# Altium footprint library WR-MJ.PcbLib: 84 footprints (part 1 of 6)
Each footprint in its own frame and in the unit in brackets; x right, y up, seen from the top. Pads: shape width x height; smd on the part's side, far side on the other; paste and mask are expansions set on the pad; w line width, h text height; cw(c..) or ccw(c..) is an arc to the next point about the centre after c.
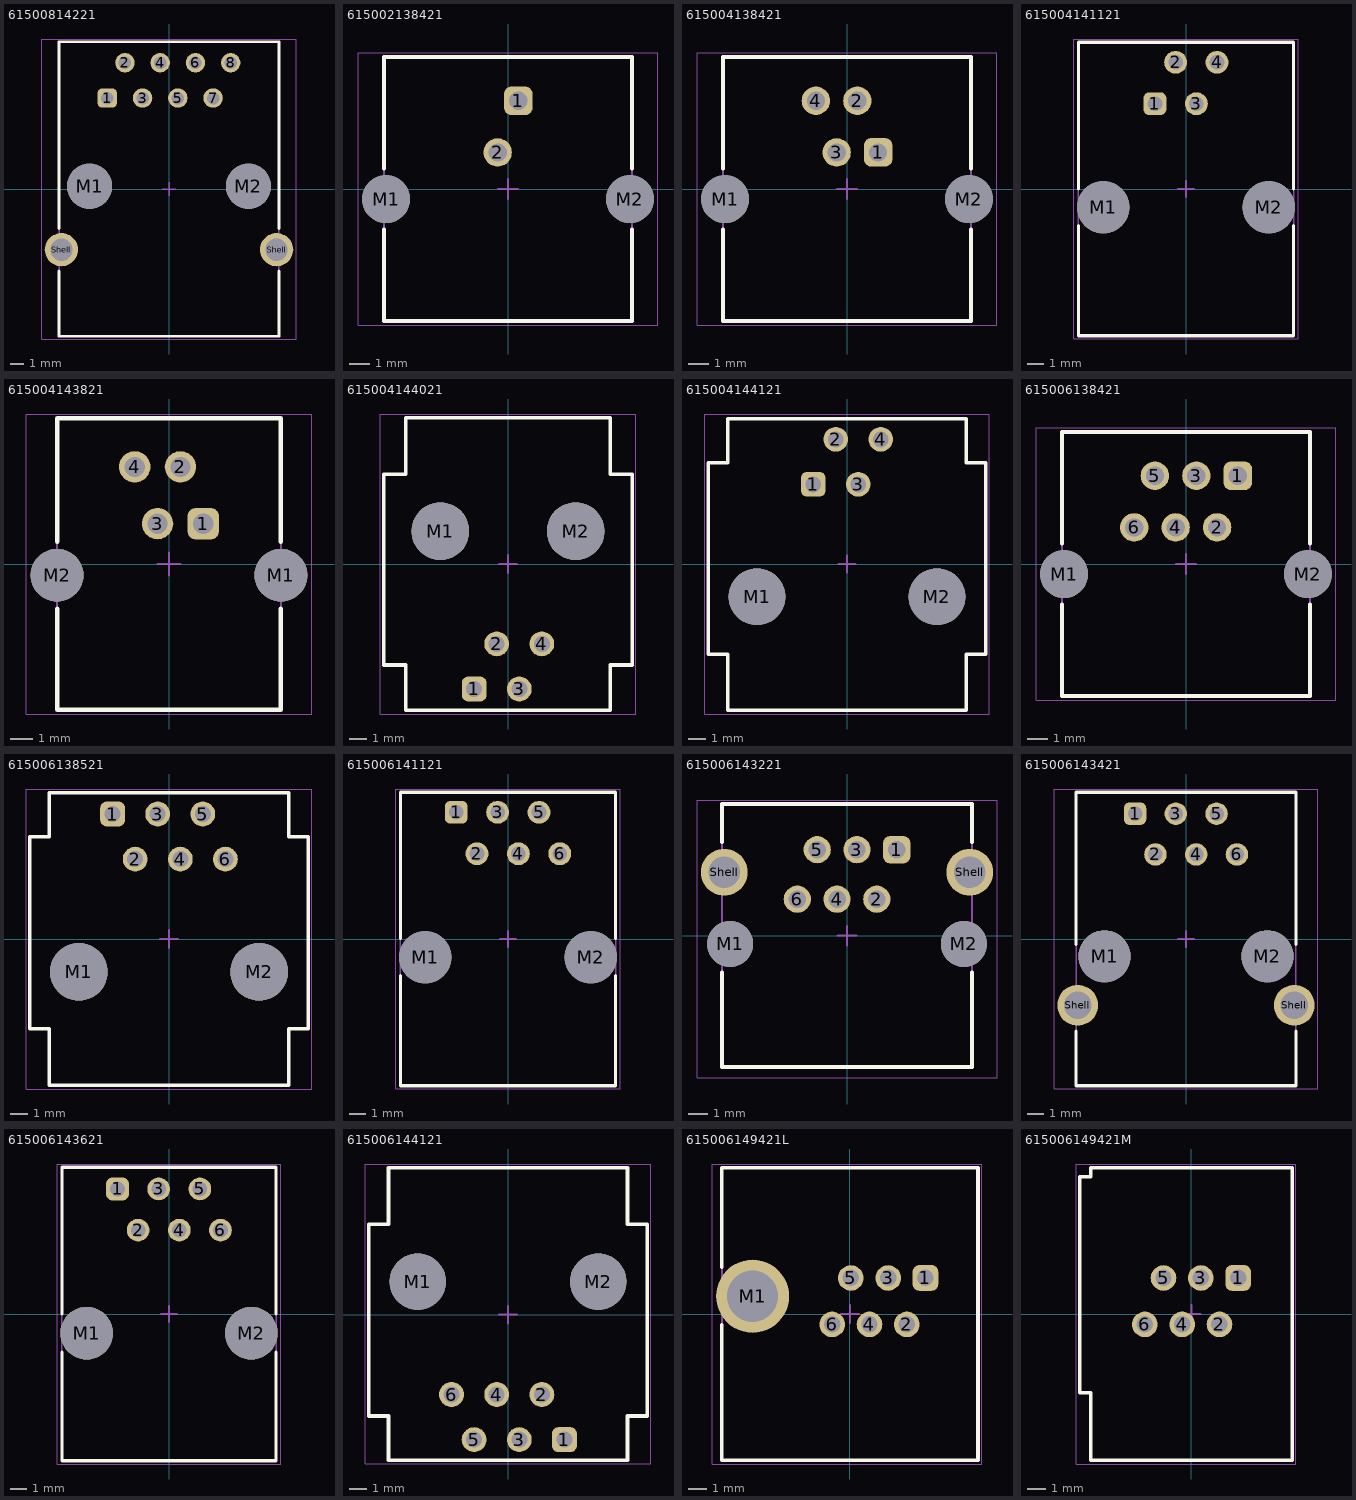
[diagram p0: the footprints below, top view; thin cyan lines are the x and y axes]

## 61500814221 [mm] "Modular Jack Horizontal Shielded 8P8C Tab Down"
height 13.65
pads (12):
  rrect50% 1.4x1.4 hole 0.9: 1(-4.445,6.55)
  round 1.4 hole 0.9: 2(-3.175,9.09) 3(-1.905,6.55) 4(-0.635,9.09) 5(0.635,6.55) 6(1.905,9.09) 7(3.175,6.55) 8(4.445,9.09)
  round 3.25 hole 3.25 unplated: M1(-5.715,0.2) M2(5.715,0.2)
  round 2.4 hole 1.6: Shell(-7.75,-4.37) Shell(7.75,-4.37)
Top Overlay:
  lines w0.2: -7.92,-5.9 -7.92,-10.6 7.92,-10.6 7.92,-5.9 ; -7.92,-2.85 -7.92,10.6 7.92,10.6 7.92,-2.85
Top Assembly:
  lines w0.1: -7.92,-10.6 7.92,-10.6 7.92,10.6 -7.92,10.6 -7.92,-10.6
Top Designator:
  text ".Designator" at -3.647,-0.357 h1
Top Courtyard:
  lines w0.05: -9.15,-10.8 -9.15,10.8 9.15,10.8 9.15,-10.8 -9.15,-10.8
Top Component Center:
  lines w0.1: -0.5,0 0.5,0 ; 0,-0.5 0,0.5
3D body "61500814221 (rev1).stp": height 13.7, standoff -3.9, extent -7.9,-10.6 7.9,10.6

## 615002138421 [mm] "Modular Jack Horizontal Plastic 6P2C Tab Up"
height 14.5
pads (4):
  rrect50% 1.4x1.4 hole 0.9: 1(0.51,4.34)
  round 1.4 hole 0.9: 2(-0.51,1.8)
  round 2.36 hole 2.36 unplated: M1(-6,-0.5) M2(6,-0.5)
Top Overlay:
  lines w0.2: -6.1,-2 -6.1,-6.5 6.1,-6.5 6.1,-2 ; -6.1,1 -6.1,6.5 6.1,6.5 6.1,1
Top Assembly:
  lines w0.1: -6.1,-6.5 -6.1,6.5 6.1,6.5 6.1,-6.5 -6.1,-6.5
Top Designator:
  text ".Designator" at -3.647,-0.357 h1
Top Courtyard:
  lines w0.05: -7.38,-6.7 7.38,-6.7 7.38,6.7 -7.38,6.7 -7.38,-6.7
Top Component Center:
  lines w0.1: -0.5,0 0.5,0 ; 0,-0.5 0,0.5
3D body "615002138421.stp": height 14.55, standoff -3.35, extent -7.2,-6.5 7.2,6.5

## 615004138421 [mm] "Modular Jack Horizontal Plastic 6P4C Tab Up"
height 14.5
pads (6):
  rrect50% 1.4x1.4 hole 0.9: 1(1.53,1.8)
  round 1.4 hole 0.9: 2(0.51,4.34) 3(-0.51,1.8) 4(-1.53,4.34)
  round 2.36 hole 2.36 unplated: M1(-6,-0.5) M2(6,-0.5)
Top Overlay:
  lines w0.2: -6.1,-2 -6.1,-6.5 6.1,-6.5 6.1,-2 ; -6.1,1 -6.1,6.5 6.1,6.5 6.1,1
Top Assembly:
  lines w0.1: -6.1,-6.5 6.1,-6.5 6.1,6.5 -6.1,6.5 -6.1,-6.5
Top Designator:
  text ".Designator" at -3.647,-0.357 h1
Top Courtyard:
  lines w0.05: -7.38,-6.7 7.38,-6.7 7.38,6.7 -7.38,6.7 -7.38,-6.7
Top Component Center:
  lines w0.1: -0.5,0 0.5,0 ; 0,-0.5 0,0.5
3D body "615004138421.stp": height 14.55, standoff -3.35, extent -7.2,-6.5 7.2,6.5

## 615004141121 [mm] "Modular Jack Horizontal Plastic 6P4C Tab Down"
height 11.65
pads (6):
  rrect50% 1.4x1.4 hole 0.9: 1(-1.905,5.23)
  round 1.4 hole 0.9: 2(-0.635,7.77) 3(0.635,5.23) 4(1.905,7.77)
  round 3.2 hole 3.2 unplated: M1(-5.08,-1.12) M2(5.08,-1.12)
Top Overlay:
  lines w0.2: -6.6,-2.239 -6.6,-9 6.6,-9 6.6,-2.239 ; -6.6,0 -6.6,9 6.6,9 6.6,0
Top Assembly:
  lines w0.1: -6.6,-9 -6.6,9 6.6,9 6.6,-9 -6.6,-9
Top Designator:
  text ".Designator" at -3.647,-0.357 h1
Top Courtyard:
  lines w0.05: -6.88,-9.2 -6.88,9.2 6.88,9.2 6.88,-9.2 -6.88,-9.2
Top Component Center:
  lines w0.1: -0.5,0 0.5,0 ; 0,-0.5 0,0.5
3D body "615004141121.stp": height 11.73, standoff -3.22, extent -6.6,-9 6.6,9

## 615004143821 [mm] "Modular Jack Horizontal Plastic 4P4C Tab Up"
height 14.5
pads (6):
  rrect50% 1.4x1.4 hole 0.9: 1(1.53,1.8)
  round 1.4 hole 0.9: 2(0.51,4.34) 3(-0.51,1.8) 4(-1.53,4.34)
  round 2.36 hole 2.36 unplated: M1(5,-0.5) M2(-5,-0.5)
Top Overlay:
  lines w0.2: -5,-2 -5,-6.5 5,-6.5 5,-2 ; -5,1 -5,6.5 5,6.5 5,1
Top Assembly:
  lines w0.1: -5,-6.5 -5,6.5 5,6.5 5,-6.5 -5,-6.5
Top Designator:
  text ".Designator" at -3.647,-0.357 h1
Top Courtyard:
  lines w0.05: -6.38,-6.7 -6.38,6.7 6.38,6.7 6.38,-6.7 -6.38,-6.7
Top Component Center:
  lines w0.1: -0.5,0 0.5,0 ; 0,-0.5 0,0.5
3D body "615004143821.stp": height 14.55, standoff -3.4, extent -6.275,-6.5 6.275,6.5

## 615004144021 [mm] "Modular Jack Vertical Plastic 4P4C with Ears"
height 16.38
pads (6):
  rrect50% 1.4x1.4 hole 0.9: 1(-1.905,-7.04)
  round 1.4 hole 0.9: 2(-0.635,-4.5) 3(0.635,-7.04) 4(1.905,-4.5)
  round 3.25 hole 3.25 unplated: M1(-3.81,1.85) M2(3.81,1.85)
Top Overlay:
  lines w0.2: -6.99,-5.69 -6.99,5.06 -5.75,5.06 -5.75,8.25 5.75,8.25 5.75,5.06 6.99,5.06 6.99,-5.69 5.75,-5.69 5.75,-8.25 -5.75,-8.25 -5.75,-5.69 -6.99,-5.69
Top Assembly:
  lines w0.1: -6.99,-5.69 -5.75,-5.69 -5.75,-8.25 5.75,-8.25 5.75,-5.69 6.99,-5.69 6.99,5.06 5.75,5.06 5.75,8.25 -5.75,8.25 -5.75,5.06 -6.99,5.06 -6.99,-5.69
Top Designator:
  text ".Designator" at -3.647,-0.357 h1
Top Courtyard:
  lines w0.05: -7.19,-8.45 7.19,-8.45 7.19,8.45 -7.19,8.45 -7.19,-8.45
Top Component Center:
  lines w0.1: -0.5,0 0.5,0 ; 0,-0.5 0,0.5
3D body "615004144021 (rev1).stp": height 16.44, standoff -3.24, extent -6.985,-8.25 6.985,8.25

## 615004144121 [mm] "Modular Jack Vertical Plastic 6P4C with Ears"
height 16.38
pads (6):
  rrect50% 1.4x1.4 hole 0.9: 1(-1.905,4.5)
  round 1.4 hole 0.9: 2(-0.635,7.04) 3(0.635,4.5) 4(1.905,7.04)
  round 3.2 hole 3.2 unplated: M1(-5.08,-1.85) M2(5.08,-1.85)
Top Overlay:
  lines w0.2: -7.845,-5.09 -6.725,-5.09 -6.725,-8.27 6.725,-8.27 6.725,-5.09 7.845,-5.09 7.845,5.71 6.725,5.71 6.725,8.21 -6.725,8.21 -6.725,5.71 -7.845,5.71 -7.845,-5.09
Top Assembly:
  lines w0.1: -7.845,-5.09 -7.845,5.71 -6.725,5.71 -6.725,8.21 6.725,8.21 6.725,5.71 7.845,5.71 7.845,-5.09 6.725,-5.09 6.725,-8.27 -6.725,-8.27 -6.725,-5.09 -7.845,-5.09
Top Designator:
  text ".Designator" at -3.647,-0.357 h1
Top Courtyard:
  lines w0.05: -8.045,-8.47 8.045,-8.47 8.045,8.47 -8.045,8.47 -8.045,-8.47
Top Component Center:
  lines w0.1: -0.5,0 0.5,0 ; 0,-0.5 0,0.5
3D body "615004144121 (rev1).stp": height 16.41, standoff -3.27, extent -7.83,-8.27 7.83,8.21

## 615006138421 [mm] "Modular Jack Horizontal Plastic 6P6C Tab Up"
height 14.5
pads (9):
  rrect50% 1.4x1.4 hole 0.9: 1(2.55,4.34)
  round 1.4 hole 0.9: 2(1.53,1.8) 3(0.51,4.34) 4(-0.51,1.8) 4(-0.51,1.8) 5(-1.53,4.34) 6(-2.55,1.8)
  round 2.36 hole 2.36 unplated: M1(-6,-0.5) M2(6,-0.5)
Top Overlay:
  lines w0.2: -6.1,-2 -6.1,-6.5 6.1,-6.5 6.1,-2 ; -6.1,1 -6.1,6.5 6.1,6.5 6.1,1
Top Assembly:
  lines w0.1: -6.1,-6.5 -6.1,6.5 6.1,6.5 6.1,-6.5 -6.1,-6.5
Top Designator:
  text ".Designator" at -3.647,-0.357 h1
Top Courtyard:
  lines w0.05: -7.38,-6.7 7.38,-6.7 7.38,6.7 -7.38,6.7 -7.38,-6.7
Top Component Center:
  lines w0.1: -0.5,0 0.5,0 ; 0,-0.5 0,0.5
3D body "615006138421.stp": height 14.55, standoff -3.35, extent -7.2,-6.5 7.2,6.5

## 615006138521 [mm] "Modular Jack Vertical Plastic 6P6C with Ears"
height 15.8
pads (8):
  rrect50% 1.4x1.4 hole 0.9: 1(-3.175,7.04)
  round 1.4 hole 0.9: 2(-1.905,4.5) 3(-0.635,7.04) 4(0.635,4.5) 5(1.905,7.04) 6(3.175,4.5)
  round 3.25 hole 3.25 unplated: M1(-5.08,-1.85) M2(5.08,-1.85)
Top Overlay:
  lines w0.2: -7.85,-5.05 -6.75,-5.05 -6.75,-8.25 6.75,-8.25 6.75,-5.05 7.85,-5.05 7.85,5.75 6.75,5.75 6.75,8.25 -6.75,8.25 -6.75,5.75 -7.85,5.75 -7.85,-5.05
Top Assembly:
  lines w0.1: -7.85,-5.05 -7.85,5.75 -6.75,5.75 -6.75,8.25 6.75,8.25 6.75,5.75 7.85,5.75 7.85,-5.05 6.75,-5.05 6.75,-8.25 -6.75,-8.25 -6.75,-5.05 -7.85,-5.05
Top Designator:
  text ".Designator" at -3.647,-0.357 h1
Top Courtyard:
  lines w0.05: -8.05,-8.45 -8.05,8.45 8.05,8.45 8.05,-8.45 -8.05,-8.45
Top Component Center:
  lines w0.1: -0.5,0 0.5,0 ; 0,-0.5 0,0.5
3D body "615006138521 (rev1).stp": height 16.2, standoff -3.4, extent -7.85,-8.25 7.85,8.25

## 615006141121 [mm] "Modular Jack Horizontal Plastic 6P6C Tab Down"
height 11.65
pads (8):
  rrect50% 1.4x1.4 hole 0.9: 1(-3.175,7.77)
  round 1.4 hole 0.9: 2(-1.905,5.23) 3(-0.635,7.77) 4(0.635,5.23) 5(1.905,7.77) 6(3.175,5.23)
  round 3.2 hole 3.2 unplated: M1(-5.08,-1.12) M2(5.08,-1.12)
Top Overlay:
  lines w0.2: -6.6,-2.25 -6.6,-9 6.6,-9 6.6,-2.25 ; -6.6,0.05 -6.6,9 6.6,9 6.6,0.05
Top Assembly:
  lines w0.1: -6.6,-9 6.6,-9 6.6,9 -6.6,9 -6.6,-9
Top Designator:
  text ".Designator" at -3.647,-0.357 h1
Top Courtyard:
  lines w0.05: -6.88,-9.2 6.88,-9.2 6.88,9.2 -6.88,9.2 -6.88,-9.2
Top Component Center:
  lines w0.1: -0.5,0 0.5,0 ; 0,-0.5 0,0.5
3D body "615006141121.stp": height 11.73, standoff -3.22, extent -6.6,-9 6.6,9

## 615006143221 [mm] "Modular Jack Horizontal Shielded 6P6C Tab Up"
height 14.75
pads (10):
  rrect50% 1.4x1.4 hole 0.9: 1(2.55,4.41)
  round 1.4 hole 0.9: 2(1.53,1.87) 3(0.51,4.41) 4(-0.51,1.87) 5(-1.53,4.41) 6(-2.55,1.87)
  round 2.36 hole 2.36 unplated: M1(-6,-0.43) M2(6,-0.43)
  round 2.4 hole 1.6: Shell(-6.3,3.25) Shell(6.3,3.25)
Top Overlay:
  lines w0.2: -6.425,-1.9 -6.425,-6.75 6.425,-6.75 6.425,-1.9 ; -6.425,4.8 -6.425,6.75 6.425,6.75 6.425,4.8
Top Assembly:
  lines w0.1: -6.425,-6.75 -6.425,6.75 6.425,6.75 6.425,-6.75 -6.425,-6.75
Top Designator:
  text ".Designator" at -3.647,-0.357 h1
Top Courtyard:
  lines w0.05: -7.7,-7.3 -7.7,6.95 7.7,6.95 7.7,-7.3 -7.7,-7.3
Top Component Center:
  lines w0.1: -0.5,0 0.5,0 ; 0,-0.5 0,0.5
3D body "615006143221 (rev1).stp": height 14.87, standoff -3.27, extent -7.179,-7.1 7.179,6.75

## 615006143421 [mm] "Modular Jack Horizontal Half Shielded 6P6C Tab Down"
height 13.07
pads (10):
  rrect50% 1.4x1.4 hole 0.9: 1(-3.175,7.81)
  round 1.4 hole 0.9: 2(-1.905,5.27) 3(-0.635,7.81) 4(0.635,5.27) 5(1.905,7.81) 6(3.175,5.27)
  round 3.25 hole 3.25 unplated: M1(-5.08,-1.08) M2(5.08,-1.08)
  round 2.55 hole 1.7: Shell(-6.75,-4.13) Shell(6.75,-4.13)
Top Overlay:
  lines w0.2: -6.85,-5.75 -6.85,-9.15 6.85,-9.15 6.85,-5.75 ; -6.85,-0.35 -6.85,9.15 6.85,9.15 6.85,-0.35
Top Assembly:
  lines w0.1: -6.85,-9.15 -6.85,9.15 6.85,9.15 6.85,-9.15 -6.85,-9.15
Top Designator:
  text ".Designator" at -3.647,-0.357 h1
Top Courtyard:
  lines w0.05: -8.225,-9.35 -8.225,9.35 8.225,9.35 8.225,-9.35 -8.225,-9.35
Top Component Center:
  lines w0.1: -0.5,0 0.5,0 ; 0,-0.5 0,0.5
3D body "615006143421.stp": height 13.15, standoff -4.05, extent -7.875,-9.15 7.875,9.15

## 615006143621 [mm] "Modular Jack Horizontal Plastic 6P6C Tab Down"
height 12.57
pads (8):
  rrect50% 1.4x1.4 hole 0.9: 1(-3.175,7.71)
  round 1.4 hole 0.9: 2(-1.905,5.17) 3(-0.635,7.71) 4(0.635,5.17) 5(1.905,7.71) 6(3.175,5.17)
  round 3.25 hole 3.25 unplated: M1(-5.08,-1.18) M2(5.08,-1.18)
Top Overlay:
  lines w0.2: -6.605,-2.35 -6.605,-9.05 6.605,-9.05 6.605,-2.35 ; -6.605,0 -6.605,9.05 6.605,9.05 6.605,0
Top Assembly:
  lines w0.1: -6.605,-9.05 6.605,-9.05 6.605,9.05 -6.605,9.05 -6.605,-9.05
Top Designator:
  text ".Designator" at -3.647,-0.357 h1
Top Courtyard:
  lines w0.05: -6.905,-9.25 6.905,-9.25 6.905,9.25 -6.905,9.25 -6.905,-9.25
Top Component Center:
  lines w0.1: -0.5,0 0.5,0 ; 0,-0.5 0,0.5
3D body "615006143621 (rev1).stp": height 12.68, standoff -3.24, extent -6.685,-9.05 6.685,9.05

## 615006144121 [mm] "Modular Jack Vertical Plastic 6P6C with Ears"
height 16.38
pads (8):
  rrect50% 1.4x1.4 hole 0.9: 1(3.175,-7.04)
  round 1.4 hole 0.9: 2(1.905,-4.5) 3(0.635,-7.04) 4(-0.635,-4.5) 5(-1.905,-7.04) 6(-3.175,-4.5)
  round 3.17 hole 3.17 unplated: M1(-5.08,1.85) M2(5.08,1.85)
Top Overlay:
  lines w0.2: -7.845,-5.71 -7.845,5.09 -6.725,5.09 -6.725,8.27 6.725,8.27 6.725,5.09 7.845,5.09 7.845,-5.71 6.725,-5.71 6.725,-8.21 -6.725,-8.21 -6.725,-5.71 -7.845,-5.71
Top Assembly:
  lines w0.1: -7.845,-5.71 -6.725,-5.71 -6.725,-8.21 6.725,-8.21 6.725,-5.71 7.845,-5.71 7.845,5.09 6.725,5.09 6.725,8.27 -6.725,8.27 -6.725,5.09 -7.845,5.09 -7.845,-5.71
Top Designator:
  text ".Designator" at -3.647,-0.357 h1
Top Courtyard:
  lines w0.05: -8.045,-8.41 8.045,-8.41 8.045,8.47 -8.045,8.47 -8.045,-8.41
Top Component Center:
  lines w0.1: -0.5,0 0.5,0 ; 0,-0.5 0,0.5
3D body "615006144121 (rev1).stp": height 16.45, standoff -3.23, extent -7.83,-8.21 7.83,8.27

## 615006149421L [mm] "Modular Jack Horizontal Plastic 6P6C Assembly Tab Up"
height 15.4
pads (7):
  rrect50% 1.4x1.4 hole 0.9: 1(4.13,1.97)
  round 1.4 hole 0.9: 2(3.11,-0.57) 3(2.09,1.97) 4(1.07,-0.57) 5(0.05,1.97) 6(-0.97,-0.57)
  round 4 hole 2.8: M1(-5.32,0.97)
Top Overlay:
  lines w0.2: -7,-0.6 -7,-8 7,-8 7,8 -7,8 -7,2.55
Top Assembly:
  lines w0.1: -7,-8 -7,8 7,8 7,-8 -7,-8
Top Designator:
  text ".Designator" at -3.647,-0.357 h1
Top Courtyard:
  lines w0.05: -7.52,-8.2 7.2,-8.2 7.2,8.2 -7.52,8.2 -7.52,-8.2
Top Component Center:
  lines w0.1: -0.5,0 0.5,0 ; 0,-0.5 0,0.5
3D body "615006149421L.stp": height 15.5, standoff -3.29, extent -7,-8 7,8

## 615006149421M [mm] "Modular Jack Horizontal Plastic 6P6C Assembly Tab Up"
height 15.4
pads (6):
  rrect50% 1.4x1.4 hole 0.9: 1(2.55,1.97)
  round 1.4 hole 0.9: 2(1.53,-0.57) 3(0.51,1.97) 4(-0.51,-0.57) 5(-1.53,1.97) 6(-2.55,-0.57)
Top Overlay:
  lines w0.2: -6.1,-4.3 -5.5,-4.3 -5.5,-8 5.5,-8 5.5,8 -5.5,8 -5.5,7.5 -6.1,7.5 -6.1,-4.3
Top Assembly:
  lines w0.1: -6.1,-4.3 -6.1,7.5 -5.5,7.5 -5.5,8 5.5,8 5.5,-8 -5.5,-8 -5.5,-4.3 -6.1,-4.3
Top Designator:
  text ".Designator" at -3.647,-0.357 h1
Top Courtyard:
  lines w0.05: -6.3,-8.2 -6.3,8.2 5.7,8.2 5.7,-8.2 -6.3,-8.2
Top Component Center:
  lines w0.1: -0.5,0 0.5,0 ; 0,-0.5 0,0.5
3D body "615006149421M.stp": height 15.5, standoff -3.29, extent -6.1,-8 5.5,8